# Altium footprint library SamacSys.PcbLib: 1008 footprints (part 38 of 63)
Each footprint in its own frame and in the unit in brackets; x right, y up, seen from the top. Pads: shape width x height; smd on the part's side, far side on the other; paste and mask are expansions set on the pad; w line width, h text height; cw(c..) or ccw(c..) is an arc to the next point about the centre after c.
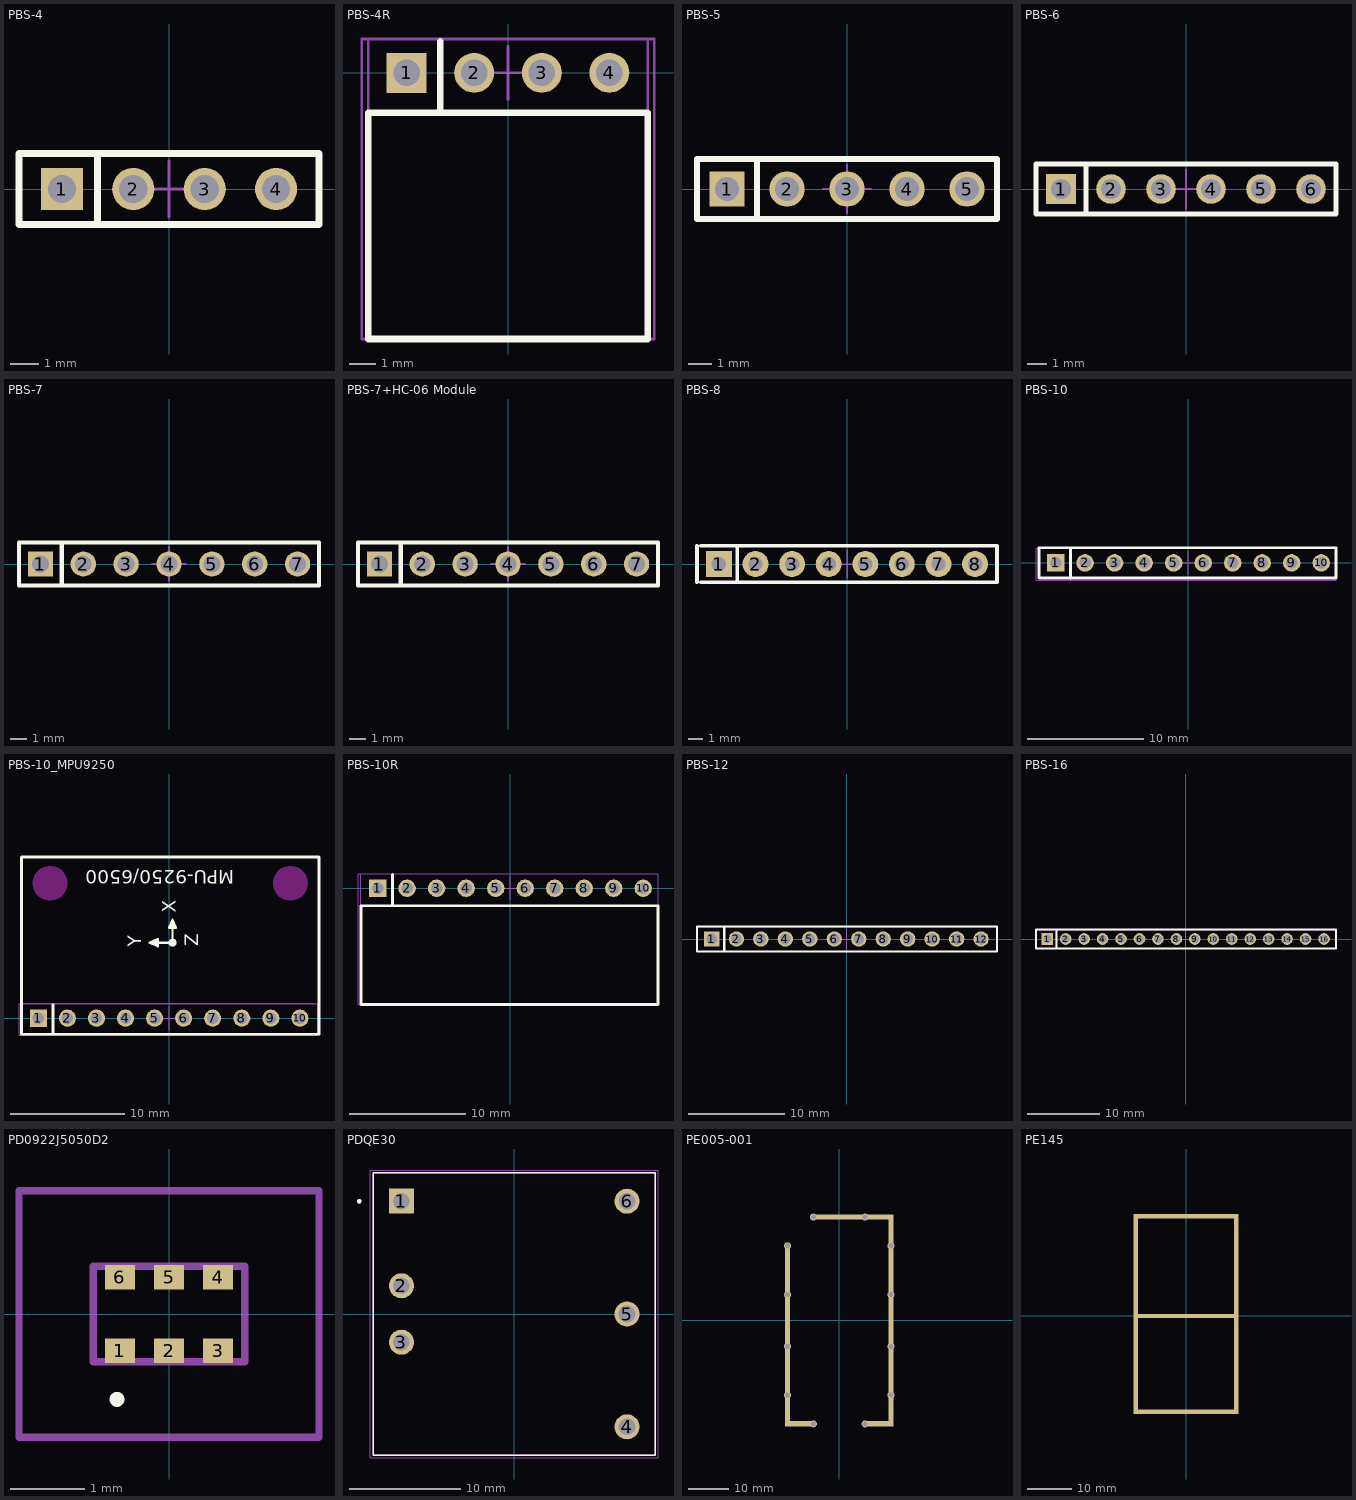
[diagram p37: the footprints below, top view; thin cyan lines are the x and y axes]

## PBS-4 [mm]
height 10
pads (4):
  rect 1.5x1.5 hole 1: 1(-3.81,0)
  round 1.5 hole 1: 2(-1.27,0) 3(1.27,0) 4(3.81,0)
Top Overlay:
  lines w0.25: -2.54,-1.27 -2.54,1.27 ; -5.334,-1.27 5.334,-1.27 5.334,1.27 -5.334,1.27 -5.334,-1.27
Assembly:
  lines w0.1: -2.54,-1.27 -2.54,1.27 ; -5.334,-1.27 5.334,-1.27 5.334,1.27 -5.334,1.27 -5.334,-1.27
Countryard:
  lines w0.1: -1,0 1,0 ; 0,-1 0,1 ; -5.334,-1.27 5.334,-1.27 5.334,1.27 -5.334,1.27 -5.334,-1.27
3D body "User Library-PBS_(DS1023)_1line_connectors_h=5_0_8_5mm_step_2_54mm.step": height 8.5, standoff -3, extent -5.33,-1.25 5.33,1.25

## PBS-4R [mm]
height 10
pads (4):
  rect 1.5x1.5 hole 1: 1(-3.81,0)
  round 1.5 hole 1: 2(-1.27,0) 3(1.27,0) 4(3.81,0)
Top Overlay:
  lines w0.25: -2.54,-1.364 -2.54,1.176 ; -5.25,-10 -5.25,-1.5 5.25,-1.5 5.25,-10 -5.25,-10
Assembly:
  lines w0.1: -2.54,-1.27 -2.54,1.27 ; -5.25,-10 -5.25,1.27 5.25,1.27 5.25,-10 -5.25,-10
Countryard:
  lines w0.1: -1,0 1,0 ; 0,-1 0,1 ; -5.5,-10 5.5,-10 5.5,1.27 -5.5,1.27 -5.5,-10
3D body "User Library-PBS-4R (DS1024).step": height 2.54, standoff -3.3, extent -5.08,-10 5.08,0.2

## PBS-5 [mm]
height 10
pads (5):
  rect 1.5x1.5 hole 1: 1(-5.08,0)
  round 1.5 hole 1: 2(-2.54,0) 3(0,0) 4(2.54,0) 5(5.08,0)
Top Overlay:
  lines w0.25: -3.81,-1.27 -3.81,1.27 ; -6.35,-1.27 6.35,-1.27 6.35,1.27 -6.35,1.27 -6.35,-1.27
Top Assembly:
  lines w0.1: -3.81,-1.27 -3.81,1.27 ; -6.35,-1.27 6.35,-1.27 6.35,1.27 -6.35,1.27 -6.35,-1.27
Top Courtyard:
  lines w0.1: -1,0 1,0 ; 0,-1 0,1 ; -6.35,-1.27 6.35,-1.27 6.35,1.27 -6.35,1.27 -6.35,-1.27
3D body "User Library-PBS_(DS1023)_1line_connectors_h=5_0_8_5mm_step_2_54mm (3).step": height 8.5, standoff -3, extent -6.6,-1.25 6.6,1.25

## PBS-6 [mm]
height 10
pads (6):
  rect 1.5x1.5 hole 1: 1(-6.35,0)
  round 1.5 hole 1: 2(-3.81,0) 3(-1.27,0) 4(1.27,0) 5(3.81,0) 6(6.35,0)
Top Overlay:
  lines w0.25: -5.08,-1.27 -5.08,1.27 ; -7.62,-1.27 7.62,-1.27 7.62,1.27 -7.62,1.27 -7.62,-1.27
Assembly:
  lines w0.1: -5.08,-1.27 -5.08,1.27 ; -7.62,-1.27 7.62,-1.27 7.62,1.27 -7.62,1.27 -7.62,-1.27
Countryard:
  lines w0.1: -1,0 1,0 ; 0,-1 0,1 ; -7.62,-1.27 7.62,-1.27 7.62,1.27 -7.62,1.27 -7.62,-1.27
3D body "User Library-PBS_(DS1023)_1line_connectors_h=5_0_8_5mm_step_2_54mm-1 (2).step": height 8.5, standoff -3, extent -7.87,-1.25 7.87,1.25

## PBS-7 [mm]
height 10
pads (7):
  rect 1.5x1.5 hole 1: 1(-7.62,0)
  round 1.5 hole 1: 2(-5.08,0) 3(-2.54,0) 4(0,0) 5(2.54,0) 6(5.08,0) 7(7.62,0)
Top Overlay:
  lines w0.25: -6.35,-1.27 -6.35,1.27 ; -8.89,-1.27 -8.89,1.27 8.89,1.27 8.89,-1.27 -8.89,-1.27
Assembly:
  lines w0.1: -6.35,-1.27 -6.35,1.27 ; -8.89,-1.27 -8.89,1.27 8.89,1.27 8.89,-1.27 -8.89,-1.27
Countryard:
  lines w0.1: -1.016,0 1.016,0 ; 0,-1 0,1.016 ; -8.89,-1.27 -8.89,1.27 8.89,1.27 8.89,-1.27 -8.89,-1.27
3D body "User Library-PBS_(DS1023)_1line_connectors_h=5_0_8_5mm_step_2_54mm (1).step": height 5, standoff -3.3, extent -9.14,-1.25 9.14,1.25

## PBS-7+HC-06 Module [mm]
height 10
pads (7):
  rect 1.5x1.5 hole 1: 1(-7.62,0)
  round 1.5 hole 1: 2(-5.08,0) 3(-2.54,0) 4(0,0) 5(2.54,0) 6(5.08,0) 7(7.62,0)
Top Overlay:
  lines w0.25: -6.35,-1.27 -6.35,1.27 ; -8.89,-1.27 8.89,-1.27 8.89,1.27 -8.89,1.27 -8.89,-1.27
Assembly:
  lines w0.1: -6.35,-1.27 -6.35,1.27 ; -8.89,-1.27 8.89,-1.27 8.89,1.27 -8.89,1.27 -8.89,-1.27
Countryard:
  lines w0.1: -1.016,0 1.016,0 ; 0,-1 0,1.016 ; -8.89,-1.27 8.89,-1.27 8.89,1.27 -8.89,1.27 -8.89,-1.27
3D body "User Library-PBS_(DS1023)_1line_connectors_h=5_0_8_5mm_step_2_54mm (1).step": height 5, standoff -3.3, extent -9.14,-1.25 9.14,1.25
3D body "HC-SERIES.stp": height 11.31, standoff -0.12, extent -6.525,-36.33 9.175,1.27

## PBS-8 [mm]
height 10
pads (8):
  rect 1.8x1.8 hole 1: 1(-8.89,0)
  round 1.8 hole 1: 2(-6.35,0) 3(-3.81,0) 4(-1.27,0) 5(1.27,0) 6(3.81,0) 7(6.35,0) 8(8.89,0)
Top Overlay:
  lines w0.25: -10.414,-1.27 -10.414,1.27 ; -10.16,-1.27 10.414,-1.27 10.414,1.27 -10.16,1.27 ; -7.62,-1.27 -7.62,1.27
Assembly:
  lines w0.1: -10.414,-1.27 -10.414,1.27 ; -10.16,-1.27 5.08,-1.27 ; -10.16,1.27 5.08,1.27 ; -7.62,-1.27 -7.62,1.27 ; 10.414,-1.27 10.414,1.27
Countryard:
  lines w0.1: -10.414,-1.27 -10.414,1.27 ; -10.16,-1.27 5.08,-1.27 ; -10.16,1.27 5.08,1.27 ; -1,0 1,0 ; 0,-1 0,1 ; 10.414,-1.27 10.414,1.27
3D body "User Library-PBS_(DS1023)_1line_connectors_h=5_0_8_5mm_step_2_54mm (1).step": height 8.5, standoff -3, extent -10.41,-1.25 10.41,1.25

## PBS-10 [mm]
height 10
pads (10):
  rect 1.5x1.5 hole 1: 1(-11.43,0)
  round 1.5 hole 1: 2(-8.89,0) 3(-6.35,0) 4(-3.81,0) 5(-1.27,0) 6(1.27,0) 7(3.81,0) 8(6.35,0) 9(8.89,0) 10(11.43,0)
Top Overlay:
  lines w0.25: -10.16,-1.364 -10.16,1.176 ; -12.87,-1.3 12.7,-1.3 12.7,1.3 -12.87,1.3 -12.87,-1.3
Assembly:
  lines w0.1: -10.16,-1.27 -10.16,1.27 ; -12.87,1.27 12.7,1.27 12.7,1.3 -12.87,1.3 -12.87,1.27
Countryard:
  lines w0.1: -1,0 1,0 ; 0,-1 0,1 ; -13.12,-1.5 -13.12,1.27 12.7,1.27 12.7,-1.5 -13.12,-1.5
3D body "User Library-PBS_(DS1023)_1line_connectors_h=5_0_8_5mm_step_2_54mm (1).step": height 8.5, standoff -3, extent -12.95,-1.3 12.95,1.2

## PBS-10_MPU9250 [mm]
height 10
pads (10):
  rect 1.5x1.5 hole 1: 1(-11.43,0)
  round 1.5 hole 1: 2(-8.89,0) 3(-6.35,0) 4(-3.81,0) 5(-1.27,0) 6(1.27,0) 7(3.81,0) 8(6.35,0) 9(8.89,0) 10(11.43,0)
Top Overlay:
  circle w0.3: c0.3,6.6 r0.2
  lines w0.2: -1.1,6.5 -1.2,6.5 -1,6.9 ; 0.2,8 0.2,8.1 0.6,7.9 ; -1.7,6.6 0.3,6.6 0.3,8.6 ; -1.7,6.6 -1,6.9 ; -1.7,6.6 -1,6.3 -1,6.9 ; 0.3,8.6 0.6,7.9 ; 0.3,8.6 0,7.9 0.6,7.9
  lines w0.25: -10.16,-1.364 -10.16,1.176 ; -12.9,-1.4 -12.9,14.1 13.1,14.1 13.1,-1.4 -12.9,-1.4
  text "MPU-9250/6500" at 5.703,13.343 h2
  text "X" at 0.953,9.227 h2
  text "Y" at -2.048,6.226 h2
  text "Z" at 2.952,6.272 h2
Keep-Out Layer:
  board cut-out: -11.9,11.8 -11.9,11.652 -11.842,11.362 -11.729,11.089 -11.565,10.844 -11.356,10.635 -11.111,10.471 -10.838,10.358 -10.548,10.3 -10.4,10.3 -10.252,10.3 -9.962,10.358 -9.689,10.471 -9.444,10.635 -9.235,10.844 -9.071,11.089 -8.958,11.362 -8.9,11.652 -8.9,11.8 -8.9,11.948 -8.958,12.238 -9.071,12.511 -9.235,12.756 -9.444,12.965 -9.689,13.129 -9.962,13.242 -10.252,13.3 -10.4,13.3 -10.548,13.3 -10.838,13.242 -11.111,13.129 -11.356,12.965 -11.565,12.756 -11.729,12.511 -11.842,12.238 -11.9,11.948
  board cut-out: 9.1,11.8 9.1,11.652 9.158,11.362 9.271,11.089 9.435,10.844 9.644,10.635 9.889,10.471 10.162,10.358 10.452,10.3 10.6,10.3 10.748,10.3 11.038,10.358 11.311,10.471 11.556,10.635 11.765,10.844 11.929,11.089 12.042,11.362 12.1,11.652 12.1,11.8 12.1,11.948 12.042,12.238 11.929,12.511 11.765,12.756 11.556,12.965 11.311,13.129 11.038,13.242 10.748,13.3 10.6,13.3 10.452,13.3 10.162,13.242 9.889,13.129 9.644,12.965 9.435,12.756 9.271,12.511 9.158,12.238 9.1,11.948
Assembly:
  lines w0.1: -10.16,-1.27 -10.16,1.27 ; -12.87,1.27 -12.87,1.3 12.7,1.3 12.7,1.27 -12.87,1.27
Countryard:
  lines w0.1: -1,0 1,0 ; 0,-1 0,1 ; -13.12,-1.5 13,-1.5 13,1.27 -13.12,1.27 -13.12,-1.5
3D body "User Library-PBS_(DS1023)_1line_connectors_h=5_0_8_5mm_step_2_54mm (1).step": height 8.5, standoff -3, extent -12.95,-1.3 12.95,1.2

## PBS-10R [mm]
height 10
pads (10):
  rect 1.5x1.5 hole 1: 1(-11.43,0)
  round 1.5 hole 1: 2(-8.89,0) 3(-6.35,0) 4(-3.81,0)
  round 1.5 hole 1 unplated: 5(-1.27,0) 6(1.27,0) 7(3.81,0) 8(6.35,0) 9(8.89,0) 10(11.43,0)
Top Overlay:
  lines w0.25: -10.16,-1.364 -10.16,1.176 ; -12.87,-10 -12.87,-1.5 12.7,-1.5 12.7,-10 -12.87,-10
Assembly:
  lines w0.1: -10.16,-1.27 -10.16,1.27 ; -12.87,-10 -12.87,1.27 12.7,1.27 12.7,-10 -12.87,-10
Countryard:
  lines w0.1: -1,0 1,0 ; 0,-1 0,1 ; -13.12,-10 12.7,-10 12.7,1.27 -13.12,1.27 -13.12,-10
3D body "User Library-PBS-10R.step": height 2.65, standoff -2.4, extent -12.7,-10.046 12.7,0.254

## PBS-12 [mm]
height 10
pads (12):
  rect 1.6x1.6 hole 1.1: 1(-13.97,0)
  round 1.6 hole 1.1: 2(-11.43,0) 3(-8.89,0) 4(-6.35,0) 5(-3.81,0) 6(-1.27,0) 7(1.27,0) 8(3.81,0) 9(6.35,0) 10(8.89,0) 11(11.43,0) 12(13.97,0)
Top Overlay:
  lines w0.25: -12.7,-1.27 -12.7,1.176 ; -15.52,-1.3 -15.52,1.3 15.62,1.3 15.62,-1.3 -15.52,-1.3
Assembly:
  lines w0.1: -12.7,-1.27 -12.7,1.27 ; -15.24,1.27 10.16,1.27 10.16,1.3 -15.24,1.3 -15.24,1.27
Countryard:
  lines w0.1: -1,0 1,0 ; 0,-1 0,1 ; -15.52,-1.27 15.62,-1.27 15.62,1.27 -15.52,1.27 -15.52,-1.27
3D body "User Library-PBS_(DS1023)_1line_connectors_h=5_0_8_5mm_step_2_54mm (2).step": height 8.5, standoff -3, extent -15.49,-1.23 15.49,1.27

## PBS-16 [mm]
height 10
pads (16):
  rect 1.6x1.6 hole 1.1: 1(-19.05,0)
  round 1.6 hole 1.1: 2(-16.51,0) 3(-13.97,0) 4(-11.43,0) 5(-8.89,0) 6(-6.35,0) 7(-3.81,0) 8(-1.27,0) 9(1.27,0) 10(3.81,0) 11(6.35,0) 12(8.89,0) 13(11.43,0) 14(13.97,0) 15(16.51,0) 16(19.05,0)
Top Overlay:
  lines w0.25: -17.78,-1.27 -17.78,1.176 ; -20.6,-1.3 -20.6,1.3 20.7,1.3 20.7,-1.3 -20.6,-1.3
Assembly:
  lines w0.1: -17.78,-1.27 -17.78,1.27 ; -20.32,1.27 5.08,1.27 5.08,1.3 -20.32,1.3 -20.32,1.27
Countryard:
  lines w0.1: -1,0 1,0 ; 0,-1 0,1 ; -20.6,-1.27 20.7,-1.27 20.7,1.27 -20.6,1.27 -20.6,-1.27
3D body "User Library-PBS_(DS1023)_1line_connectors_h=5_0_8_5mm_step_2_54mm (2).step": height 8.5, standoff -3, extent -20.57,-1.23 20.57,1.27

## PD0922J5050D2 [mm]
pads (6):
  rect 0.41x0.33 smd: 1(-0.66,-0.495) 2(0,-0.495) 3(0.66,-0.495) 4(0.66,0.495) 5(0,0.495) 6(-0.66,0.495)
Top Overlay:
  lines w0.1: -0.7,-1.2 cw(c-0.7,-1.15) -0.7,-1.1 ; -0.7,-1.2 ccw(c-0.7,-1.15) -0.7,-1.1 ; -0.7,-1.2 cw(c-0.7,-1.15) -0.7,-1.1
Assembly:
  lines w0.1: -1.02,-0.645 1.02,-0.645 1.02,0.645 -1.02,0.645 -1.02,-0.645
Countryard:
  lines w0.1: -2.02,-1.66 2.02,-1.66 2.02,1.66 -2.02,1.66 -2.02,-1.66
3D body "PD0922J5050D2.stp": height 1.03, standoff 0, extent -1.02,-0.645 1.02,0.645

## PDQE30 [mm]
height 11.7
pads (6):
  rect 2.25x2.25 hole 1.5: 1(-10.16,10.16)
  round 2.25 hole 1.5: 2(-10.16,2.54) 3(-10.16,-2.54) 4(10.16,-10.16) 5(10.16,0) 6(10.16,10.16)
Top Overlay:
  circle w0.2: c-13.97,10.16 r0.1
  lines w0.127: -12.7,-12.7 12.7,-12.7 12.7,12.7 -12.7,12.7 -12.7,-12.7
Assembly:
  circle w0.2: c-13.97,10.16 r0.1
  lines w0.127: -12.7,-12.7 12.7,-12.7 12.7,12.7 -12.7,12.7 -12.7,-12.7
Countryard:
  lines w0.05: -12.95,-12.95 -12.95,12.95 12.95,12.95 12.95,-12.95 -12.95,-12.95
3D body "step_temp.STEP": height 11.7, standoff -4.15, extent -12.65,-12.7 12.75,12.75

## PE005-001 [mm] "RF COVER"
pads (18):
  round 1.72 hole 1.25: 1(-12.7,-18.35) 1(-12.7,-6.35) 1(-12.7,6.35) 1(-12.7,18.35) 1(-6.35,-25.4) 1(-6.35,25.4) 1(6.35,-25.4) 1(6.35,25.4) 1(12.7,-18.35) 1(12.7,-6.35) 1(12.7,6.35) 1(12.7,18.35)
  rect 1.3x44.48 smd: 1(-12.7,-3.81)
  rect 6.35x1.3 smd: 1(-9.398,-25.4) 1(9.398,-25.4) 1(9.652,25.4)
  rect 12.7x1.3 smd: 1(0,25.4)
  rect 1.3x52.1 smd: 1(12.7,0)

## PE145 [mm] "RF COVER"
pads (5):
  rect 1x44.3 smd: 1(-11.4,0) 1(11.4,0)
  rect 23.8x1 smd: 1(0,-21.7) 1(0,0) 1(0,22.6)